# Altium footprint library custom-case.PcbLib: 342 footprints (part 19 of 22)
Each footprint in its own frame and in the unit in brackets; x right, y up, seen from the top. Pads: shape width x height; smd on the part's side, far side on the other; paste and mask are expansions set on the pad; w line width, h text height; cw(c..) or ccw(c..) is an arc to the next point about the centre after c.
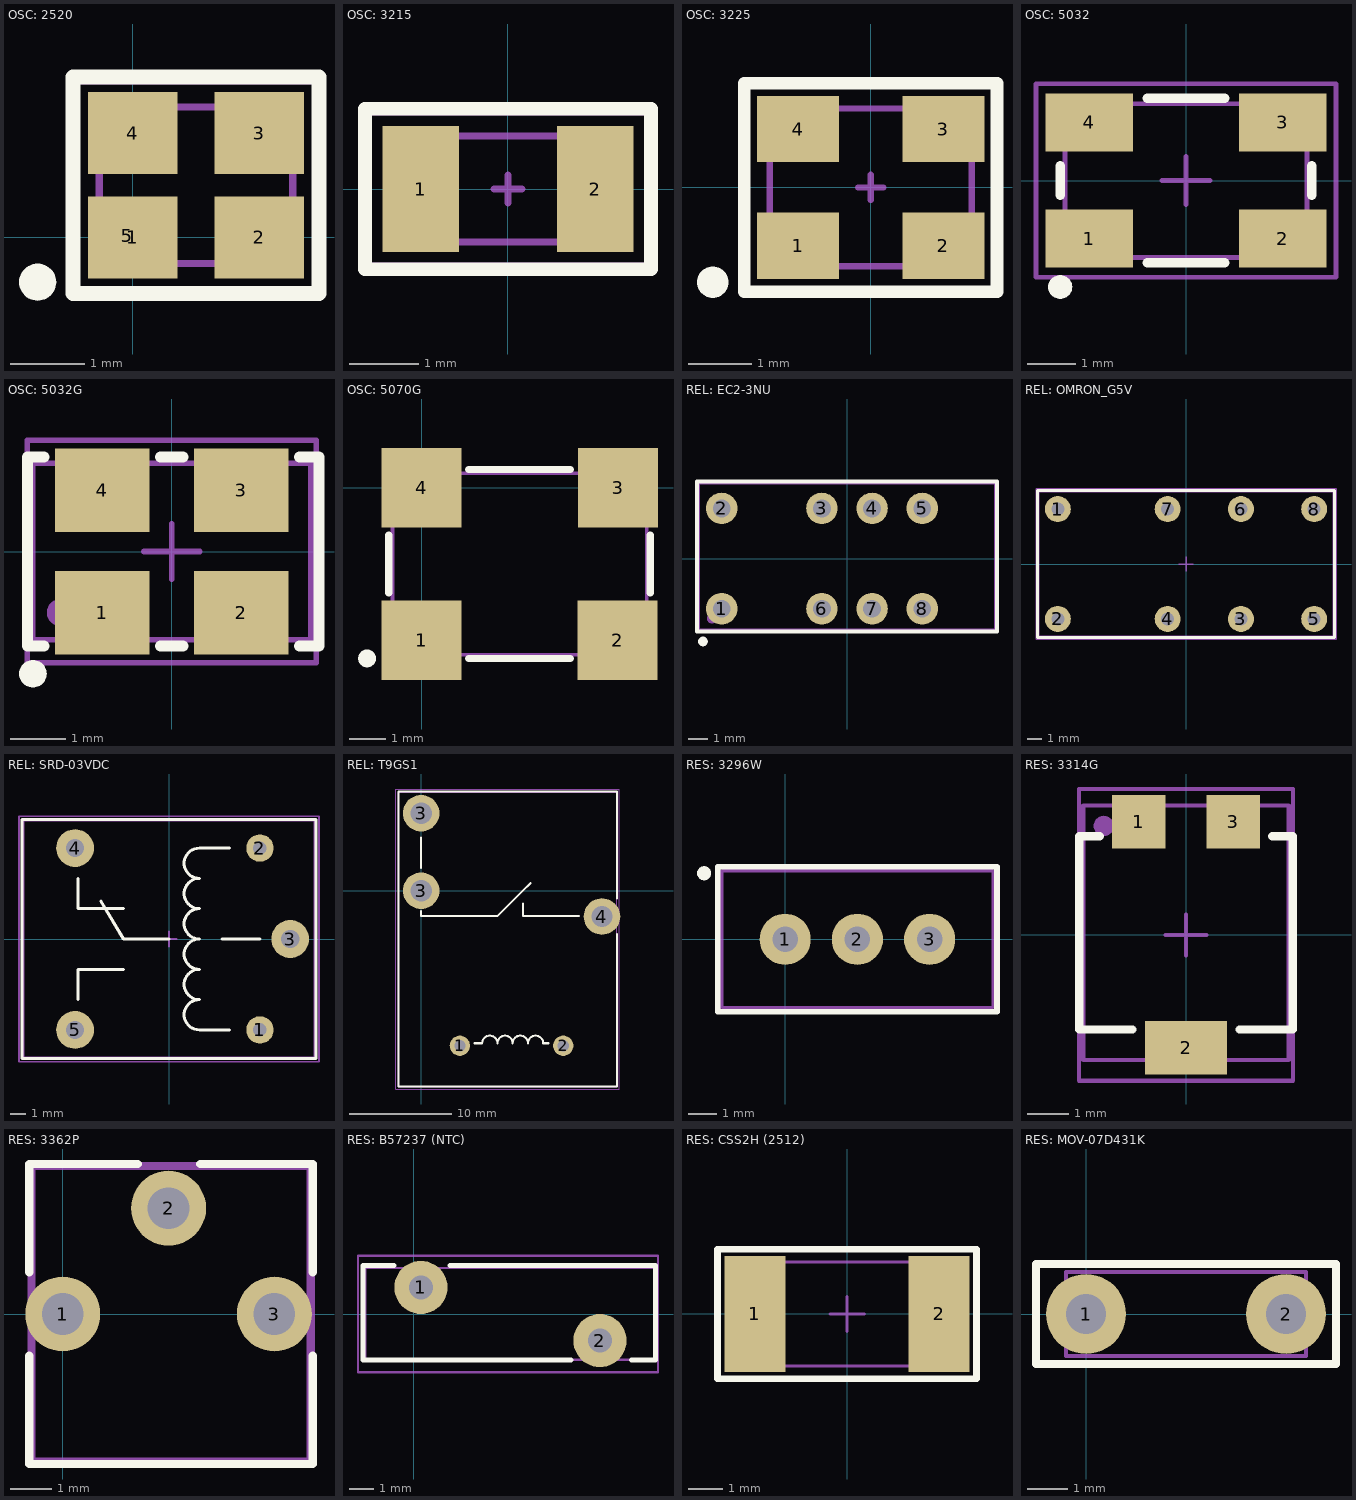
[diagram p18: the footprints below, top view; thin cyan lines are the x and y axes]

## OSC: 2520 [mm]
pads (6):
  rect 1.2x1.1 smd: 1(0,0) 2(1.7,0) 3(1.7,1.4) 4(0,1.4)
  round 0.5 on Mech1: 5(-0.075,0.025)
  round 0.5 on Top Overlay: ""(-1.275,-0.6)
Top Overlay:
  lines w0.2: -0.8,-0.75 2.5,-0.75 2.5,2.15 -0.8,2.15 -0.8,-0.75
Top Assy:
  lines w0.1: -0.45,-0.35 -0.45,1.75 2.15,1.75 2.15,-0.35 -0.45,-0.35
Size Area:
  lines w0.1: -0.8,-0.7 -0.8,2.1 2.5,2.1 2.5,-0.7 -0.8,-0.7
3D body "User Library-Crystal NDK NX2520SA series.STEP": height 0.55, standoff 0, extent -0.45,-0.35 2.15,1.75

## OSC: 3215 [mm]
pads (2):
  rect 1.1x1.8 smd: 1(-1.25,0) 2(1.25,0)
Top Overlay:
  lines w0.2: -2.05,-1.15 -2.05,1.15 2.05,1.15 2.05,-1.15 -2.05,-1.15
Top Assy:
  lines w0.1: -1.61,-0.76 1.61,-0.76 1.61,0.76 -1.61,0.76 -1.61,-0.76
Size Area:
  lines w0.1: -0.2,0 0.2,0 ; 0,-0.2 0,0.2 ; -2.05,-1.1 -2.05,1.1 2.05,1.1 2.05,-1.1 -2.05,-1.1
3D body "User Library-ABS07.STEP": height 0.91, standoff 0, extent -1.61,-0.76 1.61,0.76

## OSC: 3225 [mm]
height 0.55
pads (5):
  rect 1.3x1.05 smd: 1(-1.15,-0.925) 2(1.15,-0.925) 3(1.15,0.925) 4(-1.15,0.925)
  round 0.5 on Top Overlay: ""(-2.5,-1.5)
Top Overlay:
  lines w0.2: -2,-1.65 -2,1.65 2,1.65 2,-1.65 -2,-1.65
Top Assy:
  lines w0.1: -1.6,-1.25 1.6,-1.25 1.6,1.25 -1.6,1.25 -1.6,-1.25
Size Area:
  lines w0.1: -0.2,0 0.2,0 ; 0,-0.2 0,0.2 ; -2,-1.7 2,-1.7 2,1.6 2,1.7 -2,1.7 -2,-1.7
3D body "User Library-User Library-Siward_SX3225.step": height 0.81, standoff 0, extent -1.6,-1.25 1.6,1.25

## OSC: 5032 [mm]
pads (6):
  rect 1.8x1.2 smd: 1(-2,-1.2) 2(2,-1.2) 3(2,1.2) 4(-2,1.2)
  round 0.5 on Top Overlay: ""(-2.6,-2.2)
  round 0.5 on Mech1: ""(-2,-1.1)
Top Overlay:
  lines w0.2: -2.6,-0.3 -2.6,0.3 ; -0.8,-1.7 0.8,-1.7 ; -0.8,1.7 0.8,1.7 ; 2.6,-0.3 2.6,0.3
Top Assy:
  lines w0.1: -2.5,-1.587 2.5,-1.587 2.5,1.587 -2.5,1.587 -2.5,-1.587
Size Area:
  lines w0.1: -0.5,0 0.5,0 ; 0,-0.5 0,0.5 ; -3.1,-2 3.1,-2 3.1,2 -3.1,2 -3.1,-2
3D body "ABM3B.STEP": height 1.1, standoff -0.01, extent -2.5,-1.587 2.5,1.587

## OSC: 5032G [mm]
pads (6):
  rect 1.7x1.5 smd: 1(-1.25,-1.1) 2(1.25,-1.1) 3(1.25,1.1) 4(-1.25,1.1)
  round 0.5 on Top Overlay: ""(-2.5,-2.2)
  round 0.5 on Mech1: ""(-2,-1.1)
Top Overlay:
  lines w0.2: -2.3,-1.7 -2.6,-1.7 -2.6,1.7 -2.3,1.7 ; -0.2,-1.7 0.2,-1.7 ; -0.2,1.7 0.2,1.7 ; 2.3,-1.7 2.65,-1.7 2.65,1.7 2.3,1.7
Top Assy:
  lines w0.1: -2.5,-1.587 2.5,-1.587 2.5,1.587 -2.5,1.587 -2.5,-1.587
Size Area:
  lines w0.1: -0.5,0 0.5,0 ; 0,-0.5 0,0.5 ; -2.6,-2 2.6,-2 2.6,2 -2.6,2 -2.6,-2
3D body "User Library-ASFL1.STEP": height 1.38, standoff 0.06, extent -2.473,-1.6 2.527,1.6

## OSC: 5070G [mm]
pads (5):
  rect 2.2x2.2 smd: 1(0,-4.2) 2(5.4,-4.2) 3(5.41,0) 4(0,0)
  round 0.5 on Top Overlay: ""(-1.5,-4.7)
Top Overlay:
  lines w0.2: -0.9,-2.9 -0.9,-1.3 ; 1.3,-4.7 4.1,-4.7 ; 1.3,0.5 4.1,0.5 ; 6.3,-2.9 6.3,-1.3
Top Assy:
  lines w0.1: -0.8,-4.6 -0.8,0.4 6.2,0.4 6.2,-4.6 -0.8,-4.6
3D body "User Library-50 MHz.STEP": height 1.51, standoff -0.01, extent -0.8,-4.6 6.2,0.4

## REL: EC2-3NU [mm]
pads (10):
  round 1.6 hole 0.9: 1(-6.35,-2.54) 2(-6.35,2.54) 3(-1.27,2.54) 4(1.27,2.54) 5(3.81,2.54) 6(-1.27,-2.54) 7(1.27,-2.54) 8(3.81,-2.54)
  round 0.5 on Top Overlay: ""(-7.3,-4.2)
  round 0.5 on Mech1: ""(-6.85,-3.04)
Top Overlay:
  lines w0.2: -7.6,-3.7 -7.6,3.9 7.6,3.9 7.6,-3.7 -7.6,-3.7
Top Assy:
  lines w0.1: -7.5,-3.59 -7.5,3.81 7.5,3.81 7.5,-3.59 -7.5,-3.59
Size Area:
  lines w0.1: -7.55,-3.64 -7.55,3.86 7.55,3.86 7.55,-3.64 -7.55,-3.64
3D body "User Library-EC2-12.STEP": height 8.2, standoff -3.5, extent -7.5,-3.59 7.5,3.81

## REL: OMRON_G5V [mm] "Omron G5V relay"
height 10
pads (8):
  round 1.8 hole 0.9: 1(-8.89,3.81) 2(-8.89,-3.81) 3(3.81,-3.81) 4(-1.27,-3.81) 5(8.89,-3.81) 6(3.81,3.81) 7(-1.27,3.81) 8(8.89,3.81)
Top Overlay:
  lines w0.2: -10.3,-5.1 -10.3,5.1 10.3,5.1 10.3,-5.1 -10.3,-5.1
Top Assy:
  lines w0.1: -10.2,-5 10.2,-5 10.2,5 -10.2,5 -10.2,-5
Size Area:
  lines w0.1: -0.5,0 0.5,0 ; 0,-0.5 0,0.5 ; -10.4,-5.207 -10.4,5.207 10.4,5.207 10.4,-5.207 -10.4,-5.207
3D body "OMRON G5V-2.step": height 10.92, standoff -4, extent -10.2,-5 10.2,5

## REL: SRD-03VDC [mm]
pads (5):
  round 1.8 hole 0.9: 1(6,-6) 2(6,6)
  round 2.5 hole 1.2: 3(8,0) 4(-6.2,6) 5(-6.2,-6)
Top Overlay:
  lines w0.2: -6,-4 -6,-2 -3,-2 ; -6,4 -6,2 -3,2 ; -4.5,2.5 -3,0 0,0 ; 3.5,0 6,0 ; 4,-6 2,-6 cw(c2,-5) 2,-4 cw(c2,-3) 2,-2 cw(c2,-1) 2,0 cw(c2,1) 2,2 cw(c2,3) 2,4 cw(c2,5) 2,6 4,6 ; -9.7,-7.9 -9.7,7.9 9.7,7.9 9.7,-7.9 -9.7,-7.9
Top Assy:
  lines w0.1: -6,-4 -6,-2 -3,-2 ; -6,4 -6,2 -3,2 ; -4.5,2.5 -3,0 0,0 ; 3.5,0 6,0 ; 4,-6 2,-6 cw(c2,-5) 2,-4 cw(c2,-3) 2,-2 cw(c2,-1) 2,0 cw(c2,1) 2,2 cw(c2,3) 2,4 cw(c2,5) 2,6 4,6 ; -9.6,-7.8 9.6,-7.8 9.6,7.8 -9.6,7.8 -9.6,-7.8
Size Area:
  lines w0.1: -0.5,0 0.5,0 ; 0,-0.5 0,0.5 ; -9.9,-8.1 -9.9,8.1 9.9,8.1 9.9,-8.1 -9.9,-8.1
3D body "6666.STEP": height 15.8, standoff -3, extent -9.6,-7.8 9.6,7.8

## REL: T9GS1 [mm]
pads (5):
  round 2 hole 1.1: 1(3.81,-15.24) 2(13.97,-15.24)
  round 3.6 hole 2.1: 3(0,0) 3(0,7.62) 4(17.78,-2.54)
Top Overlay:
  lines w0.2: 0,-2 0,-2.5 7.5,-2.5 10,0 ; 0,2.25 0,5.25 ; 5.25,-15 6,-15 cw(c6.75,-15) 7.5,-15 cw(c8.25,-15) 9,-15 cw(c9.75,-15) 10.5,-15 cw(c11.25,-15) 12,-15 12.5,-15 ; 10,-1.25 10,-2.5 15.5,-2.5 ; 10.75,0.75 10,0 ; 19.25,-4.25 19.25,-19.25 -2.25,-19.25 -2.25,9.75 19.25,9.75 19.25,-0.75 ; 10,0 10,0
3D model:
  lines w0.1: -2.25,-19.3 19.25,-19.3 19.25,9.7 -2.25,9.7 -2.25,-19.3
Size Area:
  lines w0.1: -2.5,-19.5 -2.5,10 19.5,10 19.5,-19.5 -2.5,-19.5
3D body "T9GS1L14-12.STEP": height 15.7, standoff -3.5, extent -2.25,-19.3 19.25,9.7

## RES: 3296W [mm]
pads (4):
  round 1.8 hole 0.9: 1(0,0) 2(2.54,0) 3(5.08,0)
  round 0.5 on Top Overlay: ""(-2.85,2.325)
Top Overlay:
  lines w0.2: -2.375,-2.55 -2.375,2.55 7.45,2.55 7.45,-2.55 -2.375,-2.55
Top Assy:
  lines w0.1: -2.225,-2.4 -2.225,2.4 7.305,2.4 7.305,-2.4 -2.225,-2.4
Size Area:
  lines w0.1: -2.3,-2.5 7.4,-2.5 7.4,2.5 -2.3,2.5 -2.3,-2.5
3D body "User Library-3296W.STEP": height 11.55, standoff -1.6, extent -2.225,-2.4 7.305,2.4

## RES: 3314G [mm]
pads (4):
  rect 1.3x1.3 smd: 1(-1.15,2.75) 3(1.15,2.75)
  rect 2x1.3 smd: 2(0,-2.75)
  round 0.5 on Mech1: ""(-2,2.65)
Top Overlay:
  lines w0.2: -2.1,2.4 -2.6,2.4 -2.6,-2.3 -1.3,-2.3 ; 1.3,-2.3 2.6,-2.3 2.6,2.4 2.1,2.4
Top Assy:
  lines w0.1: -2.499,-3.049 -2.499,3.149 2.5,3.149 2.5,-3.049 -2.499,-3.049
Size Area:
  lines w0.1: -0.5,0 0.5,0 ; 0,-0.5 0,0.5 ; -2.6,-3.55 -2.6,3.55 2.6,3.55 2.6,-3.55 -2.6,-3.55
3D body "3314g-1-103e.stp": height 2.72, standoff -0.01, extent -2.499,-3.049 2.5,3.149

## RES: 3362P [mm]
pads (3):
  round 1.8 hole 1: 1(0,0) 2(2.54,2.54) 3(5.08,0)
Top Overlay:
  lines w0.2: -0.8,-1 -0.8,-3.6 6,-3.6 6,-1 ; -0.8,1 -0.8,3.6 1.8,3.6 ; 3.3,3.6 6,3.6 6,1
Top Assy:
  lines w0.1: -0.7,-3.49 5.9,-3.49 5.9,3.5 -0.7,3.5 -0.7,-3.49
Size Area:
  lines w0.1: -0.8,-3.6 6,-3.6 6,3.6 -0.8,3.6 -0.8,-3.6
3D body "User Library-R_3362P.STEP": height 4.5, standoff -3, extent -0.7,-3.49 5.9,3.5

## RES: B57237 (NTC) [mm]
pads (2):
  round 2.2 hole 1: 1(0.3,1.1) 2(7.7,-1.1)
Top Overlay:
  lines w0.2: -0.8,2 -2.1,2 -2.1,-1.9 6.5,-1.9 ; 1.5,2 10,2 10,-1.9 9,-1.9
Top Assy:
  lines w0.1: -2,-1.9 -2,1.902 10,1.902 10,-1.9 -2,-1.9
Size Area:
  lines w0.1: -2.3,-2.4 10.1,-2.4 10.1,2.4 -2.3,2.4 -2.3,-2.4
3D body "User Library-S10K275.STEP": height 13, standoff -2.5, extent -2,-1.9 10,1.902

## RES: CSS2H (2512) [mm]
pads (2):
  rect 1.8x3.4 smd: 1(-2.7,0) 2(2.7,0)
Top Overlay:
  lines w0.2: -3.8,-1.9 3.8,-1.9 3.8,1.9 -3.8,1.9 -3.8,-1.9
Top Assy:
  lines w0.1: -3.175,-1.525 -3.175,1.525 3.175,1.525 3.175,-1.525 -3.175,-1.525
Size Area:
  lines w0.1: -0.5,0 0.5,0 ; 0,-0.5 0,0.5 ; -3.85,-1.9 -3.85,1.9 3.85,1.9 3.85,-1.9 -3.85,-1.9
3D body "CSS2H-2512.STEP": height 0.83, standoff 0, extent -3.175,-1.525 3.175,1.525

## RES: MOV-07D431K [mm]
pads (2):
  round 2 hole 1: 1(0,0) 2(5,0)
Top Overlay:
  lines w0.2: -1.25,-1.25 -1.25,1.25 6.25,1.25 6.25,-1.25 -1.25,-1.25
Top Assy:
  lines w0.1: -0.5,-1.05 -0.5,1.05 5.5,1.05 5.5,-1.05 -0.5,-1.05
Size Area:
  lines w0.1: -1.25,-1.25 6.25,-1.25 6.25,1.25 -1.25,1.25 -1.25,-1.25
3D body "User Library-Disc_CAP d6x3_5_5mm.STEP": height 8.1, standoff -2.02, extent -0.5,-1.05 5.5,1.05